# Altium footprint library S_D.PcbLib: 40 footprints (part 2 of 3)
Each footprint in its own frame and in the unit in brackets; x right, y up, seen from the top. Pads: shape width x height; smd on the part's side, far side on the other; paste and mask are expansions set on the pad; w line width, h text height; cw(c..) or ccw(c..) is an arc to the next point about the centre after c.
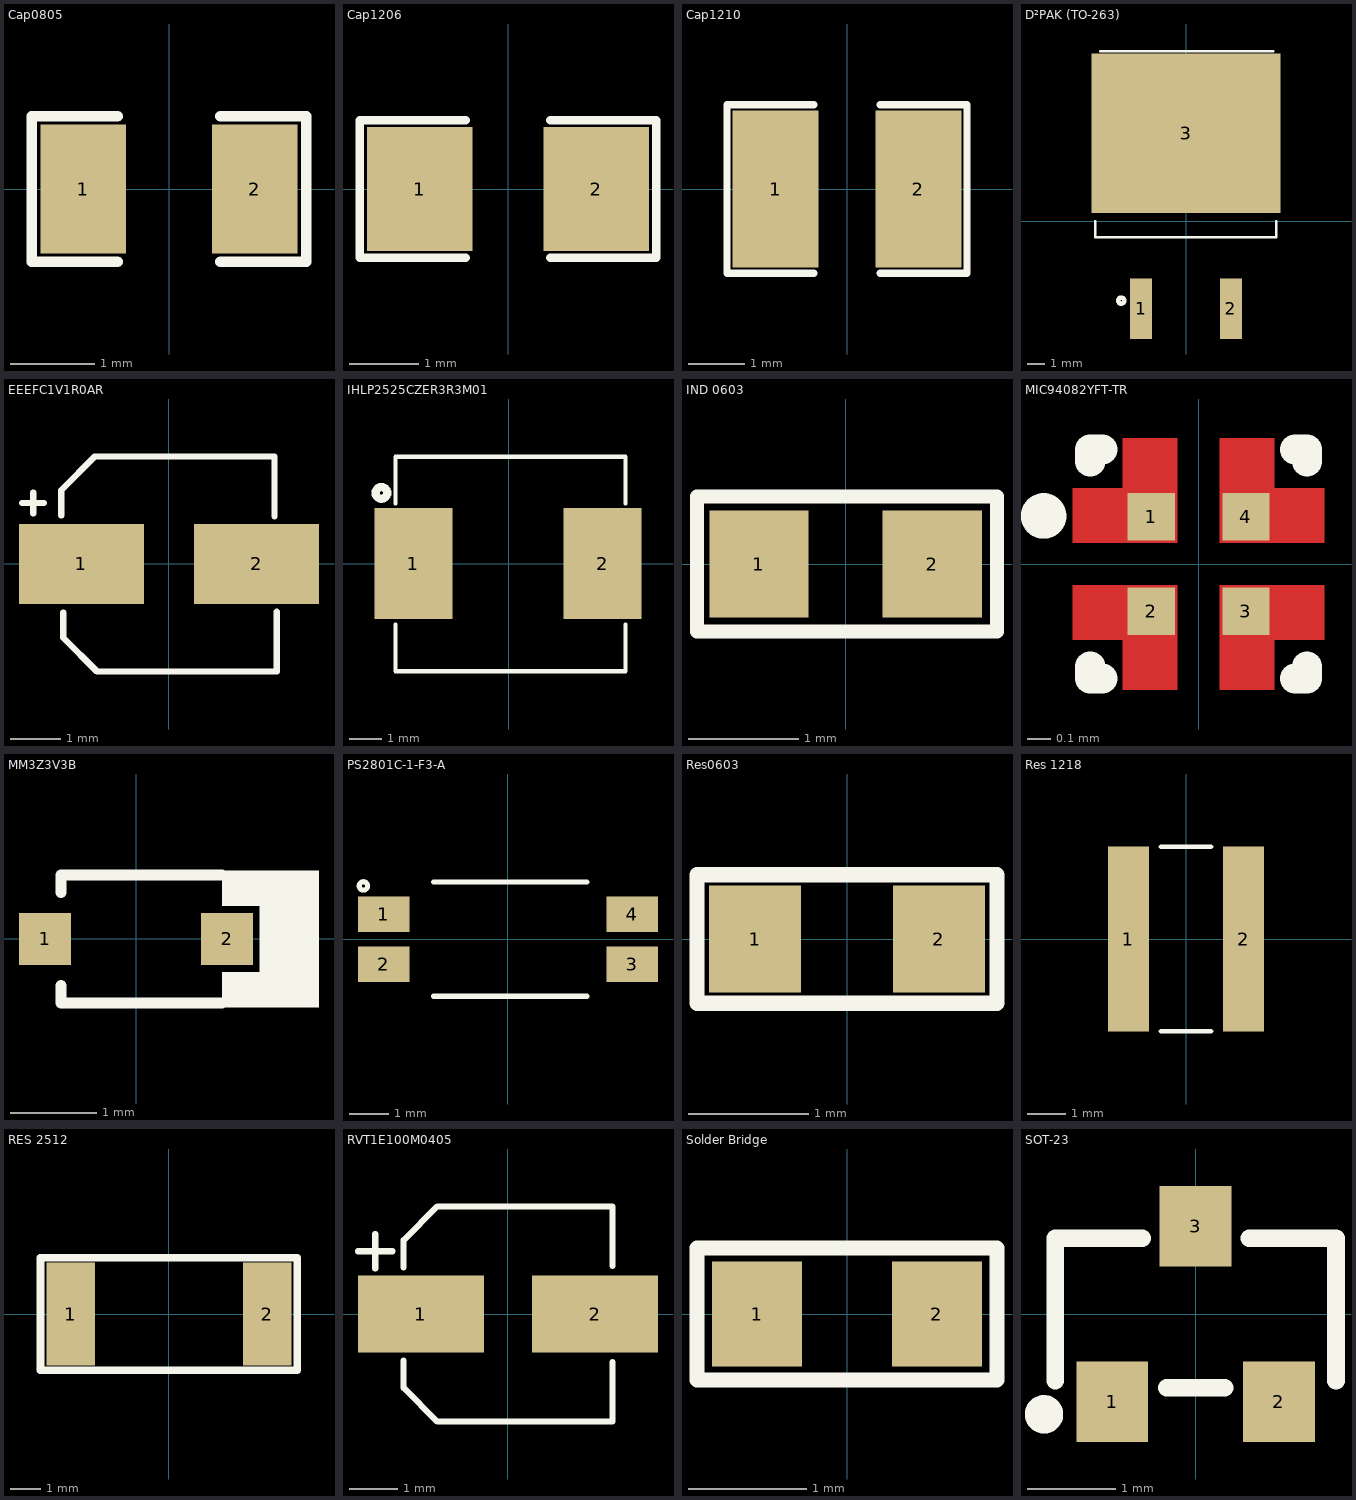
[diagram p1: the footprints below, top view; thin cyan lines are the x and y axes]

## Cap0805 [mil] "SMD 0805"
pads (2):
  rect 40x60 smd mask+2.76: 1(-40,0) 2(40,0)
Top Overlay:
  lines w5: -24,-34 -64,-34 -64,34 -24,34 ; 24,-34 64,-34 64,34 24,34
3D body "User Library-0805 SMD Capacitor.step": height 30, standoff -0.79, extent -39.36,-24.6 39.38,24.61

## Cap1206 [mil] "SMD 1206"
pads (2):
  rect 60x70 smd: 1(-50,0) 2(50,0)
Top Overlay:
  lines w5: -24,-39 -84,-39 -84,39 -24,39 ; 24,-39 84,-39 84,39 24,39
3D body "User Library-1206 SMD Capacitor.step": height 39.45, standoff 0, extent -62.96,-31.46 63.03,31.53

## Cap1210 [mil] "SMD 1210"
pads (2):
  rect 60x110 smd: 1(-50,0) 2(50,0)
Top Overlay:
  lines w5: -23,-59 -84,-59 -84,59 -23,59 ; 23,-59 84,-59 84,59 23,59
3D body "User Library-CAPC3225X10.step": height 39.37, standoff 0, extent -62.99,-49.21 63,49.22

## D²PAK (TO-263) [mil]
pads (3):
  rect 49.49x134.65 smd: 1(-100,-195) 2(100,-195)
  rect 420x355 smd: 3(0,195)
Top Overlay:
  circle w10: c-144,-177 r6.71
  lines w5: -202,0 -202,-36 201,-36 201,0 ; -191,378 194,378
3D body "D2PAK-2 L7805.step": height 200, standoff 0, extent -196.84,-240.95 196.86,374.18

## EEEFC1V1R0AR [mm] "ALUM CAP 1uF 35V"
pads (2):
  rect 2.5x1.6 smd: 1(-1.75,0) 2(1.75,0)
Top Overlay:
  lines w0.127: -2.936,1.219 -2.504,1.219 ; -2.718,1.01 -2.718,1.431 ; -2.155,0.971 -2.155,1.477 -1.482,2.15 2.111,2.15 2.111,0.954 ; -2.114,-0.971 -2.114,-1.477 -1.441,-2.15 2.152,-2.15 2.152,-0.954
3D body "EEEFC1V1R0AR.STEP": height 5.8, standoff 0, extent -2.5,-2.15 2.5,2.15

## IHLP2525CZER3R3M01 [mil] "6A 3.3uH ±20% 28mO SMD Power Inductors ROHS"
pads (2):
  rect 95x135 smd: 1(-116,0) 2(114,0)
Top Overlay:
  circle w10: c-155,86 r7.07
  lines w5: -138,-74 -138,-131 142,-131 142,-74 ; -138,73 -138,130 142,130 142,73
3D body "IHLP2525CZ.step": height 114.76, standoff 1.26, extent -137.3,-132 141.3,130.6

## IND 0603 [mm]
pads (2):
  rect 0.9x0.97 smd: 1(-0.785,0) 2(0.785,0)
Top Overlay:
  lines w0.127: -1.346,-0.61 -1.346,0.61 1.372,0.61 1.372,-0.61 -1.346,-0.61
3D body "45630.stp": height 0.78, standoff -0.02, extent -0.8,-0.4 0.8,0.4

## MIC94082YFT-TR [mm]
pads (4):
  rect 0.2x0.2 smd paste-1 mask+0: 1(-0.2,0.2) 2(-0.2,-0.2) 3(0.2,-0.2) 4(0.2,0.2)
Top Layer:
  region: 0.32,0.32 0.53,0.32 0.53,0.09 0.09,0.09 0.09,0.53 0.32,0.53
  region: -0.09,-0.53 -0.32,-0.53 -0.32,-0.32 -0.53,-0.32 -0.53,-0.09 -0.09,-0.09
  region: 0.53,-0.32 0.32,-0.32 0.32,-0.53 0.09,-0.53 0.09,-0.09 0.53,-0.09
  region: -0.09,0.09 -0.53,0.09 -0.53,0.32 -0.32,0.32 -0.32,0.53 -0.09,0.53
Top Overlay:
  lines w0.127: -0.622,0.212 ccw(c-0.653,0.203) -0.621,0.205 ; -0.457,-0.432 -0.457,-0.483 -0.406,-0.483 ; -0.457,0.432 -0.457,0.483 -0.406,0.483 ; 0.406,-0.483 0.457,-0.483 0.457,-0.432 ; 0.406,0.483 0.457,0.483 0.457,0.432
Top Paste:
  region: 0.32,0.32 0.49,0.32 0.49,0.09 0.09,0.09 0.09,0.53 0.32,0.53
  region: -0.09,-0.53 -0.32,-0.53 -0.32,-0.32 -0.49,-0.32 -0.49,-0.09 -0.09,-0.09
  region: 0.49,-0.32 0.32,-0.32 0.32,-0.53 0.09,-0.53 0.09,-0.09 0.49,-0.09
  region: -0.09,0.09 -0.49,0.09 -0.49,0.32 -0.32,0.32 -0.32,0.53 -0.09,0.53
Top Solder:
  region: 0.37,0.37 0.58,0.37 0.58,0.04 0.04,0.04 0.04,0.58 0.37,0.58
  region: -0.04,-0.58 -0.37,-0.58 -0.37,-0.37 -0.58,-0.37 -0.58,-0.04 -0.04,-0.04
  region: 0.58,-0.37 0.37,-0.37 0.37,-0.58 0.04,-0.58 0.04,-0.04 0.58,-0.04
  region: -0.04,0.04 -0.58,0.04 -0.58,0.37 -0.37,0.37 -0.37,0.58 -0.04,0.58
3D body "MIC94082YFT-TR.STEP": height 0.6, standoff 0, extent -0.425,-0.425 0.425,0.425

## MM3Z3V3B [mm] "DIODE ZENER 3.3V 200MW SOD323F"
pads (2):
  rect 0.6x0.6 smd: 1(-1.05,0) 2(1.05,0)
Top Overlay:
  rectangle: 0.988,0.381 2.108,0.787
  rectangle: 0.988,-0.787 2.108,-0.381
  rectangle: 1.422,-0.406 2.108,0.457
  lines w0.127: -0.864,-0.533 -0.864,-0.737 0.988,-0.737 ; -0.864,0.533 -0.864,0.737 0.988,0.737
3D body "User Library-SOD323F-1.step": height 1, standoff 0, extent -1.25,-0.675 1.25,0.675

## PS2801C-1-F3-A [mm]
pads (4):
  rect 1.3x0.9 smd: 1(-3.15,0.635) 2(-3.15,-0.635) 3(3.15,-0.635) 4(3.15,0.635)
Top Overlay:
  circle w0.127: c-3.663,1.346 r0.107
  lines w0.127: -1.885,-1.448 2.001,-1.448 ; -1.885,1.448 2.001,1.448
3D body "User Library-SOP-4-1.step": height 2.1, standoff 0, extent -3.5,-1.4 3.5,1.4

## Res0603 [mil]
pads (2):
  rect 30x35 smd: 1(-30,0) 2(30,0)
Top Overlay:
  lines w5: -49,-21 49,-21 49,21 -49,21 -49,-21
3D body "User Library-RESC1608X05N.step": height 17.76, standoff 0, extent -30.52,-16.74 30.51,16.73

## Res 1218 [mm]
pads (2):
  rect 1.05x4.77 smd: 1(-1.485,0) 2(1.485,0)
Top Overlay:
  lines w0.127: -0.64,-2.38 0.64,-2.38 ; -0.64,2.38 0.64,2.38
3D body "RCL121833R0FKEK.STEP": height 0.6, standoff 0, extent -1.6,-2.3 1.6,2.3

## RES 2512 [mm] "0.033O ±1% 2W ±1800ppm/°C 2512 Low Resistors & Current Sense Resistors - Surface Mount RoHS"
pads (2):
  rect 1.6x3.4 smd: 1(-3.25,0) 2(3.25,0)
Top Overlay:
  lines w0.254: -4.242,-1.854 4.237,-1.854 4.237,1.854 -4.242,1.854 -4.242,-1.854
3D body "CircuitWorks-RESISTOR 2512.step": height 0.58, standoff -0.03, extent -3.175,-1.63 3.175,1.63

## RVT1E100M0405 [mm] "10uF 25V 5.4mm SMD"
pads (2):
  rect 2.6x1.6 smd: 1(-1.8,0) 2(1.8,0)
Top Overlay:
  lines w0.127: -3.099,1.295 -2.388,1.295 ; -2.743,0.94 -2.743,1.651 ; -2.159,-0.965 -2.159,-1.524 -1.46,-2.222 -1.27,-2.222 2.159,-2.222 2.159,-0.991 ; -2.159,0.965 -2.159,1.524 -1.46,2.222 -1.27,2.222 2.159,2.222 2.159,0.991
3D body "User Library-4x5_4.step": height 5.7, standoff 0, extent -2.65,-2.15 2.65,2.15

## Solder Bridge [mil] "Solder Bridge ON"
pads (2):
  rect 30x35 smd: 1(-30,0) 2(30,0)
Top Overlay:
  lines w5: -50,-22 50,-22 50,22 -50,22 -50,-22

## SOT-23 [mm] "TRANS NPN 40V 0.6A SOT23"
pads (3):
  rect 0.82x0.92 smd: 1(-0.95,-1) 2(0.95,-1) 3(0,1)
Top Overlay:
  circle w0.254: c-1.727,-1.143 r0.092
  lines w0.2: -1.6,-0.762 -1.6,0.864 -0.61,0.864 ; -0.33,-0.838 0.33,-0.838 ; 0.61,0.864 1.6,0.864 1.6,-0.762
3D body "CircuitWorks-SOT-23.step": height 1.05, standoff -0.05, extent -1.5,-1.25 1.5,1.25